# Altium integrated library C1608X5R1C475K080AC.IntLib: 1 symbol
Pins are listed as number, name and electrical type; pins without a type are passive.

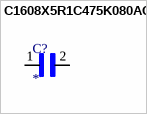
[diagram p0: symbol C1608X5R1C475K080AC]

## C1608X5R1C475K080AC
designator C?
4.7ÂµF Â±10% 16V Ceramic Capacitor X5R 0603 (1608 Metric); MP: C1608X5R1C475K080AC; MF: TDK; Value: *; Package: 1608 TDK; Check_prices: https://www.snapeda.com/parts/C1608X5R1C475K080AC/TDK-Lambda+Americas+Inc/view-part/?ref=eda; Price: None; Purchase-URL: https://pricing.snapeda.com/search/part/C1608X5R1C475K080AC/?ref=eda; SnapEDA_Link: https://www.snapeda.com/parts/C1608X5R1C475K080AC/TDK-Lambda+Americas+Inc/view-part/?ref=snap; Availability: In Stock
footprint CAPC1608X90N
pins: 1, 2